# EAGLE library part ICL7660ACBAZA (library ICL7660ACBAZA)
The ICL7660S and ICL7660A Super Voltage Converters are monolithic CMOS voltage conversion ICs that guarantee significant performance advantages over other similar devices. They are direct replacements for the industry standard ICL7660 offering an extended operating supply voltage range up to 12V, with lower supply current. A Frequency Boost pin has been incorporated to enable the user to achieve lower output impedance despite using smaller capacitors. All improvements are highlighted in the Electrical Spec Source: Datasheet <https://www.renesas.com/en-us/www/doc/datasheet/icl7660s-a.pdf>
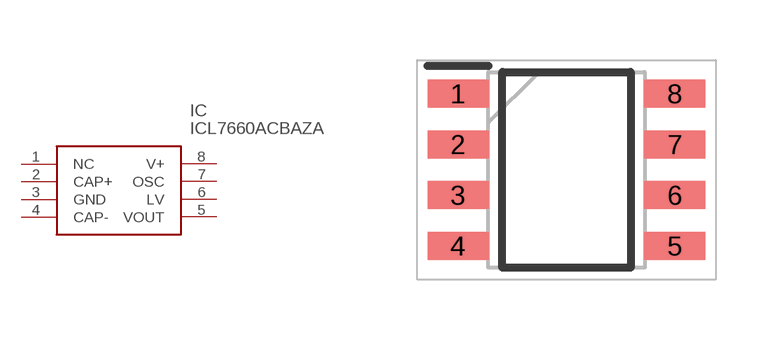
[diagram p0: symbol with the pads of SOIC127P600X175-8N; footprint SOIC127P600X175-8N]

Designator prefix IC

## ICL7660ACBAZA (Description: The ICL7660S and ICL7660A Super Voltage Converters are monolithic CMOS voltage conversion ICs that guarantee significant performance advantages over other similar devices. They are direct replacements for the industry standard ICL7660 offering an extended operating supply voltage range up to 12V, with lower supply current. A Frequency Boost pin has been incorporated to enable the user to achieve lower output impedance despite using smaller capacitors. All improvements are highlighted in the Electrical Spec; Height: 1.75mm; Manufacturer_Name: Renesas Electronics; Manufacturer_Part_Number: ICL7660ACBAZA; Mouser_Part_Number: 968-ICL7660ACBAZA; Mouser_Price-Stock: https://www.mouser.co.uk/ProductDetail/Renesas-Intersil/ICL7660ACBAZA?qs=9fLuogzTs8LeW4me0pfrFQ%3D%3D)  [SOIC127P600X175-8N]
1  NC  nc
2  CAP+
3  GND
4  CAP-
5  VOUT
6  LV
7  OSC
8  V+

## Footprint SOIC127P600X175-8N (pad centres in mm)
M8.15-ren4
smd 1.525 x 0.7: 1 -2.712,1.905; 2 -2.712,0.635; 3 -2.712,-0.635; 4 -2.712,-1.905; 5 2.712,-1.905; 6 2.712,-0.635; 7 2.712,0.635; 8 2.712,1.905